# Altium footprint library Miscellaneous Connectors.PcbLib: 245 footprints (part 1 of 16)
Each footprint in its own frame and in the unit in brackets; x right, y up, seen from the top. Pads: shape width x height; smd on the part's side, far side on the other; paste and mask are expansions set on the pad; w line width, h text height; cw(c..) or ccw(c..) is an arc to the next point about the centre after c.
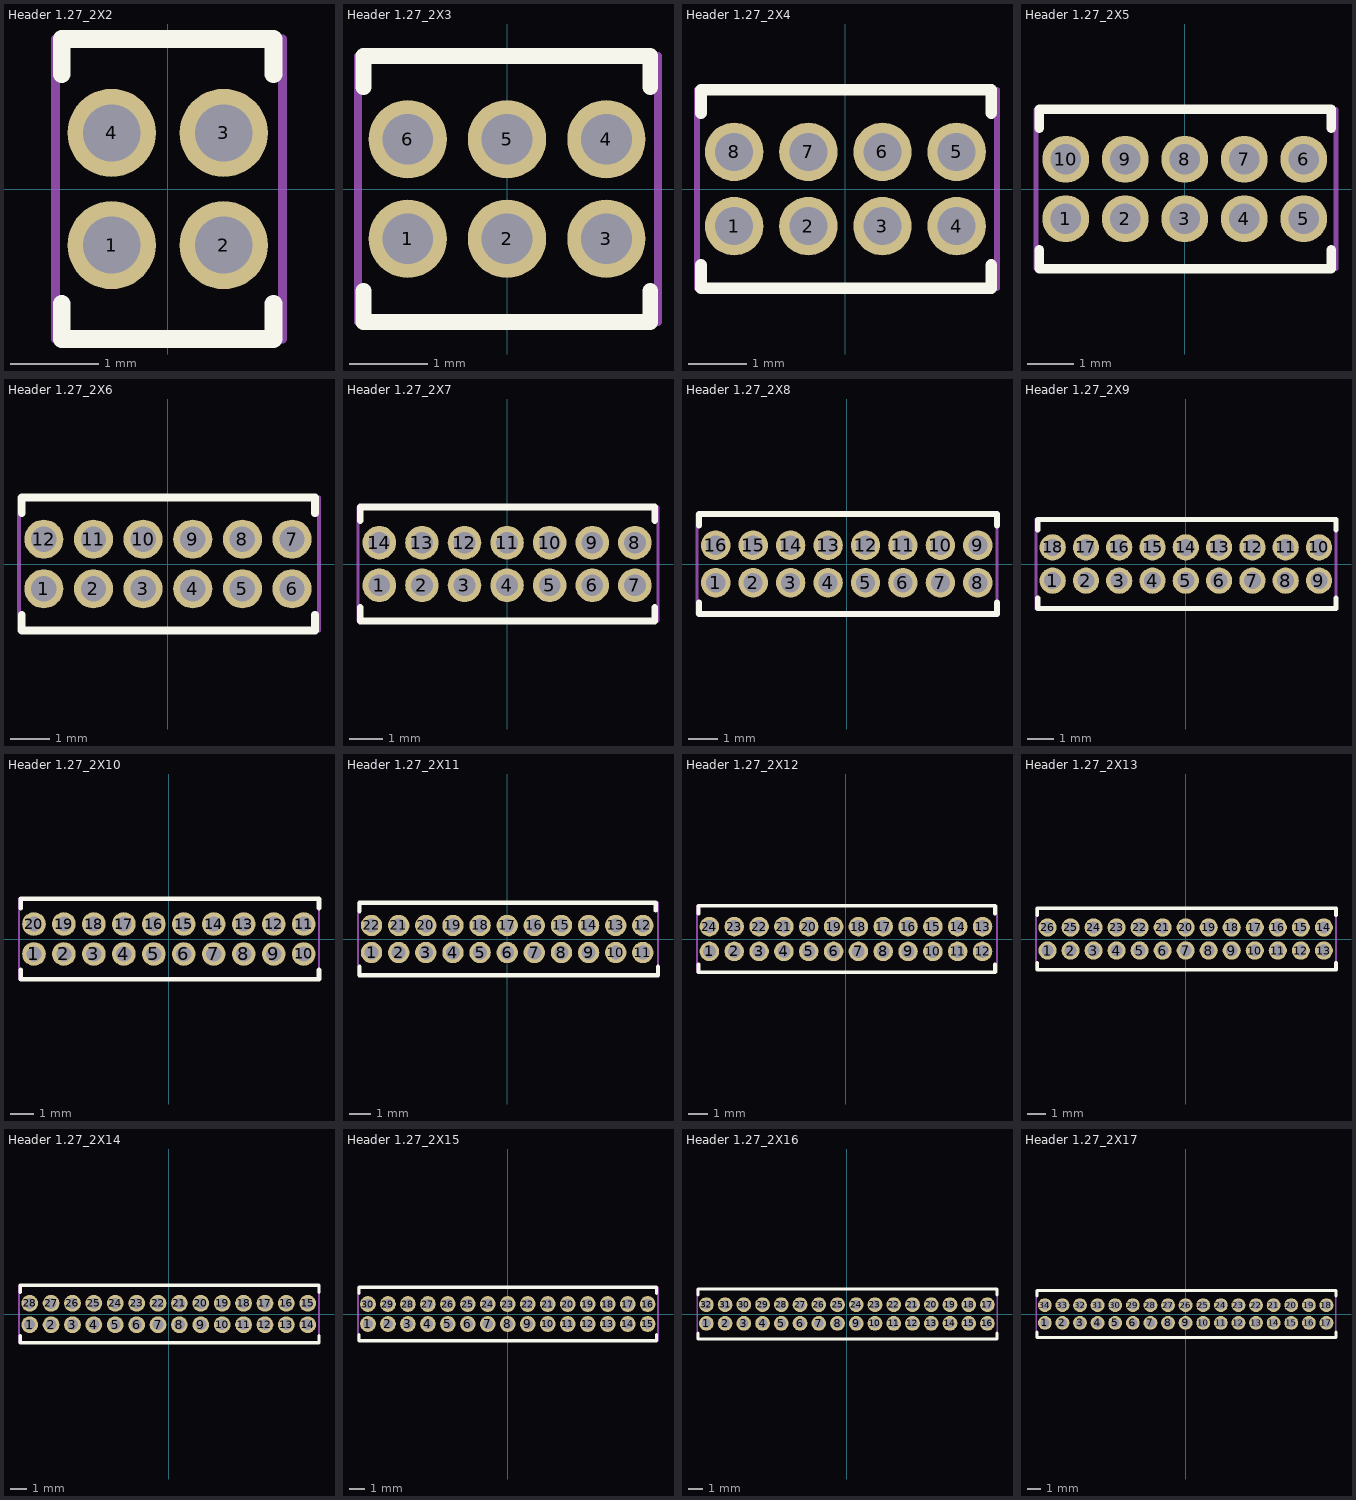
[diagram p0: the footprints below, top view; thin cyan lines are the x and y axes]

## Header 1.27_2X2 [mm]
pads (4):
  round 1 hole 0.65: 1(-0.635,-0.635) 2(0.635,-0.635) 3(0.635,0.635) 4(-0.635,0.635)
Top Overlay:
  lines w0.2: -1.2,-1.3 -1.2,-1.7 1.2,-1.7 1.2,-1.3 ; -1.2,1.3 -1.2,1.7 1.2,1.7 1.2,1.3
Mechanical 15:
  lines w0.1: -1.27,-1.7 -1.27,1.7 1.3,1.7 1.3,-1.7 -1.27,-1.7
3D body: height 4.7, standoff -2.6, extent -1.27,-1.5 1.27,1.5

## Header 1.27_2X3 [mm]
pads (6):
  round 1 hole 0.65: 1(-1.27,-0.635) 2(0,-0.635) 3(1.27,-0.635) 4(1.27,0.635) 5(0,0.635) 6(-1.27,0.635)
Top Overlay:
  lines w0.2: -1.835,-1.3 -1.835,-1.7 1.83,-1.7 1.83,-1.3 ; -1.835,1.3 -1.835,1.7 1.83,1.7 1.83,1.3
Mechanical 15:
  lines w0.1: -1.905,-1.7 -1.905,1.7 1.93,1.7 1.93,-1.7 -1.905,-1.7
3D body: height 4.7, standoff -2.6, extent -1.905,-1.5 1.905,1.5

## Header 1.27_2X4 [mm]
pads (8):
  round 1 hole 0.65: 1(-1.905,-0.635) 2(-0.635,-0.635) 3(0.635,-0.635) 4(1.905,-0.635) 5(1.905,0.635) 6(0.635,0.635) 7(-0.635,0.635) 8(-1.905,0.635)
Top Overlay:
  lines w0.2: -2.47,-1.3 -2.47,-1.7 2.495,-1.7 2.495,-1.3 ; -2.47,1.3 -2.47,1.7 2.495,1.7 2.495,1.3
Mechanical 15:
  lines w0.1: -2.54,-1.7 -2.54,1.7 2.595,1.7 2.595,-1.7 -2.54,-1.7
3D body: height 4.7, standoff -2.6, extent -2.54,-1.5 2.54,1.5

## Header 1.27_2X5 [mm]
pads (10):
  round 1 hole 0.65: 1(-2.54,-0.635) 2(-1.27,-0.635) 3(0,-0.635) 4(1.27,-0.635) 5(2.54,-0.635) 6(2.54,0.635) 7(1.27,0.635) 8(0,0.635) 9(-1.27,0.635) 10(-2.54,0.635)
Top Overlay:
  lines w0.2: -3.105,-1.3 -3.105,-1.7 3.13,-1.7 3.13,-1.3 ; -3.105,1.3 -3.105,1.7 3.13,1.7 3.13,1.3
Mechanical 15:
  lines w0.1: -3.175,-1.7 -3.175,1.7 3.23,1.7 3.23,-1.7 -3.175,-1.7
3D body: height 4.7, standoff -2.6, extent -3.175,-1.5 3.175,1.5

## Header 1.27_2X6 [mm]
pads (12):
  round 1 hole 0.65: 1(-3.175,-0.635) 2(-1.905,-0.635) 3(-0.635,-0.635) 4(0.635,-0.635) 5(1.905,-0.635) 6(3.175,-0.635) 7(3.175,0.635) 8(1.905,0.635) 9(0.635,0.635) 10(-0.635,0.635) 11(-1.905,0.635) 12(-3.175,0.635)
Top Overlay:
  lines w0.2: -3.74,-1.3 -3.74,-1.7 3.765,-1.7 3.765,-1.3 ; -3.74,1.3 -3.74,1.7 3.765,1.7 3.765,1.3
Mechanical 15:
  lines w0.1: -3.81,-1.7 -3.81,1.7 3.865,1.7 3.865,-1.7 -3.81,-1.7
3D body: height 4.7, standoff -2.6, extent -3.81,-1.5 3.81,1.5

## Header 1.27_2X7 [mm]
pads (14):
  round 1 hole 0.65: 1(-3.81,-0.635) 2(-2.54,-0.635) 3(-1.27,-0.635) 4(0,-0.635) 5(1.27,-0.635) 6(2.54,-0.635) 7(3.81,-0.635) 8(3.81,0.635) 9(2.54,0.635) 10(1.27,0.635) 11(0,0.635) 12(-1.27,0.635) 13(-2.54,0.635) 14(-3.81,0.635)
Top Overlay:
  lines w0.2: -4.375,-1.3 -4.375,-1.7 4.4,-1.7 4.4,-1.3 ; -4.375,1.3 -4.375,1.7 4.4,1.7 4.4,1.3
Mechanical 15:
  lines w0.1: -4.445,-1.7 4.5,-1.7 4.5,1.7 -4.445,1.7 -4.445,-1.7
3D body: height 4.7, standoff -2.6, extent -4.445,-1.5 4.445,1.5

## Header 1.27_2X8 [mm]
pads (16):
  round 1 hole 0.65: 1(-4.445,-0.635) 2(-3.175,-0.635) 3(-1.905,-0.635) 4(-0.635,-0.635) 5(0.635,-0.635) 6(1.905,-0.635) 7(3.175,-0.635) 8(4.445,-0.635) 9(4.445,0.635) 10(3.175,0.635) 11(1.905,0.635) 12(0.635,0.635) 13(-0.635,0.635) 14(-1.905,0.635) 15(-3.175,0.635) 16(-4.445,0.635)
Top Overlay:
  lines w0.2: -5.01,-1.3 -5.01,-1.7 5.095,-1.7 5.095,-1.3 ; -5.01,1.3 -5.01,1.7 5.095,1.7 5.095,1.3
Mechanical 15:
  lines w0.1: -5.08,-1.7 -5.08,1.7 5.095,1.7 5.095,-1.7 -5.08,-1.7
3D body: height 4.7, standoff -2.6, extent -5.08,-1.5 5.08,1.5

## Header 1.27_2X9 [mm]
pads (18):
  round 1 hole 0.65: 1(-5.08,-0.635) 2(-3.81,-0.635) 3(-2.54,-0.635) 4(-1.27,-0.635) 5(0,-0.635) 6(1.27,-0.635) 7(2.54,-0.635) 8(3.81,-0.635) 9(5.08,-0.635) 10(5.08,0.635) 11(3.81,0.635) 12(2.54,0.635) 13(1.27,0.635) 14(0,0.635) 15(-1.27,0.635) 16(-2.54,0.635) 17(-3.81,0.635) 18(-5.08,0.635)
Top Overlay:
  lines w0.2: -5.645,-1.3 -5.645,-1.7 5.73,-1.7 5.73,-1.3 ; -5.645,1.3 -5.645,1.7 5.73,1.7 5.73,1.3
Mechanical 15:
  lines w0.1: -5.715,-1.7 5.73,-1.7 5.73,1.7 -5.715,1.7 -5.715,-1.7
3D body: height 4.7, standoff -2.6, extent -5.715,-1.5 5.715,1.5

## Header 1.27_2X10 [mm]
pads (20):
  round 1 hole 0.65: 1(-5.715,-0.635) 2(-4.445,-0.635) 3(-3.175,-0.635) 4(-1.905,-0.635) 5(-0.635,-0.635) 6(0.635,-0.635) 7(1.905,-0.635) 8(3.175,-0.635) 9(4.445,-0.635) 10(5.715,-0.635) 11(5.715,0.635) 12(4.445,0.635) 13(3.175,0.635) 14(1.905,0.635) 15(0.635,0.635) 16(-0.635,0.635) 17(-1.905,0.635) 18(-3.175,0.635) 19(-4.445,0.635) 20(-5.715,0.635)
Top Overlay:
  lines w0.2: -6.28,-1.3 -6.28,-1.7 6.365,-1.7 6.365,-1.3 ; -6.28,1.3 -6.28,1.7 6.365,1.7 6.365,1.3
Mechanical 15:
  lines w0.1: -6.35,-1.7 -6.35,1.7 6.365,1.7 6.365,-1.7 -6.35,-1.7
3D body: height 4.7, standoff -2.6, extent -6.35,-1.5 6.35,1.5

## Header 1.27_2X11 [mm]
pads (22):
  round 1 hole 0.65: 1(-6.35,-0.635) 2(-5.08,-0.635) 3(-3.81,-0.635) 4(-2.54,-0.635) 5(-1.27,-0.635) 6(0,-0.635) 7(1.27,-0.635) 8(2.54,-0.635) 9(3.81,-0.635) 10(5.08,-0.635) 11(6.35,-0.635) 12(6.35,0.635) 13(5.08,0.635) 14(3.81,0.635) 15(2.54,0.635) 16(1.27,0.635) 17(0,0.635) 18(-1.27,0.635) 19(-2.54,0.635) 20(-3.81,0.635) 21(-5.08,0.635) 22(-6.35,0.635)
Top Overlay:
  lines w0.2: -6.915,-1.3 -6.915,-1.7 7.06,-1.7 7.06,-1.3 ; -6.915,1.3 -6.915,1.7 6.96,1.7 6.96,1.335
Mechanical 15:
  lines w0.1: -6.985,-1.7 7.06,-1.7 7.06,1.7 -6.985,1.7 -6.985,-1.7
3D body: height 4.7, standoff -2.6, extent -6.985,-1.5 6.985,1.5

## Header 1.27_2X12 [mm]
pads (24):
  round 1 hole 0.65: 1(-6.985,-0.635) 2(-5.715,-0.635) 3(-4.445,-0.635) 4(-3.175,-0.635) 5(-1.905,-0.635) 6(-0.635,-0.635) 7(0.635,-0.635) 8(1.905,-0.635) 9(3.175,-0.635) 10(4.445,-0.635) 11(5.715,-0.635) 12(6.985,-0.635) 13(6.985,0.635) 14(5.715,0.635) 15(4.445,0.635) 16(3.175,0.635) 17(1.905,0.635) 18(0.635,0.635) 19(-0.635,0.635) 20(-1.905,0.635) 21(-3.175,0.635) 22(-4.445,0.635) 23(-5.715,0.635) 24(-6.985,0.635)
Top Overlay:
  lines w0.2: -7.55,-1.3 -7.55,-1.7 7.625,-1.7 7.625,-1.3 ; -7.55,1.3 -7.55,1.7 7.625,1.7 7.625,1.3
Mechanical 15:
  lines w0.1: -7.62,-1.7 -7.62,1.7 7.725,1.7 7.725,-1.7 -7.62,-1.7
3D body: height 4.7, standoff -2.6, extent -7.62,-1.5 7.62,1.5

## Header 1.27_2X13 [mm]
pads (26):
  round 1 hole 0.65: 1(-7.62,-0.635) 2(-6.35,-0.635) 3(-5.08,-0.635) 4(-3.81,-0.635) 5(-2.54,-0.635) 6(-1.27,-0.635) 7(0,-0.635) 8(1.27,-0.635) 9(2.54,-0.635) 10(3.81,-0.635) 11(5.08,-0.635) 12(6.35,-0.635) 13(7.62,-0.635) 14(7.62,0.635) 15(6.35,0.635) 16(5.08,0.635) 17(3.81,0.635) 18(2.54,0.635) 19(1.27,0.635) 20(0,0.635) 21(-1.27,0.635) 22(-2.54,0.635) 23(-3.81,0.635) 24(-5.08,0.635) 25(-6.35,0.635) 26(-7.62,0.635)
Top Overlay:
  lines w0.2: -8.185,-1.3 -8.185,-1.7 8.29,-1.7 8.29,-1.3 ; -8.185,1.3 -8.185,1.7 8.29,1.7 8.29,1.3
Mechanical 15:
  lines w0.1: -8.255,-1.7 8.29,-1.7 8.29,1.7 -8.255,1.7 -8.255,-1.7
3D body: height 4.7, standoff -2.6, extent -8.255,-1.5 8.255,1.5

## Header 1.27_2X14 [mm]
pads (28):
  round 1 hole 0.65: 1(-8.255,-0.635) 2(-6.985,-0.635) 3(-5.715,-0.635) 4(-4.445,-0.635) 5(-3.175,-0.635) 6(-1.905,-0.635) 7(-0.635,-0.635) 8(0.635,-0.635) 9(1.905,-0.635) 10(3.175,-0.635) 11(4.445,-0.635) 12(5.715,-0.635) 13(6.985,-0.635) 14(8.255,-0.635) 15(8.255,0.635) 16(6.985,0.635) 17(5.715,0.635) 18(4.445,0.635) 19(3.175,0.635) 20(1.905,0.635) 21(0.635,0.635) 22(-0.635,0.635) 23(-1.905,0.635) 24(-3.175,0.635) 25(-4.445,0.635) 26(-5.715,0.635) 27(-6.985,0.635) 28(-8.255,0.635)
Top Overlay:
  lines w0.2: -8.82,-1.3 -8.82,-1.7 8.925,-1.7 8.925,-1.3 ; -8.82,1.3 -8.82,1.7 8.925,1.7 8.925,1.3
Mechanical 15:
  lines w0.1: -8.89,-1.7 -8.89,1.7 8.925,1.7 8.925,-1.7 -8.89,-1.7
3D body: height 4.7, standoff -2.6, extent -8.89,-1.5 8.89,1.5

## Header 1.27_2X15 [mm]
pads (30):
  round 1 hole 0.65: 1(-8.89,-0.635) 2(-7.62,-0.635) 3(-6.35,-0.635) 4(-5.08,-0.635) 5(-3.81,-0.635) 6(-2.54,-0.635) 7(-1.27,-0.635) 8(0,-0.635) 9(1.27,-0.635) 10(2.54,-0.635) 11(3.81,-0.635) 12(5.08,-0.635) 13(6.35,-0.635) 14(7.62,-0.635) 15(8.89,-0.635) 16(8.89,0.635) 17(7.62,0.635) 18(6.35,0.635) 19(5.08,0.635) 20(3.81,0.635) 21(2.54,0.635) 22(1.27,0.635) 23(0,0.635) 24(-1.27,0.635) 25(-2.54,0.635) 26(-3.81,0.635) 27(-5.08,0.635) 28(-6.35,0.635) 29(-7.62,0.635) 30(-8.89,0.635)
Top Overlay:
  lines w0.2: -9.455,-1.3 -9.455,-1.7 9.45,-1.7 9.45,-1.3 ; -9.455,1.3 -9.455,1.7 9.45,1.7 9.45,1.3
Mechanical 15:
  lines w0.1: -9.525,-1.7 9.55,-1.7 9.55,1.7 -9.525,1.7 -9.525,-1.7
3D body: height 4.7, standoff -2.6, extent -9.525,-1.5 9.525,1.5

## Header 1.27_2X16 [mm]
pads (32):
  round 1 hole 0.65: 1(-9.525,-0.635) 2(-8.255,-0.635) 3(-6.985,-0.635) 4(-5.715,-0.635) 5(-4.445,-0.635) 6(-3.175,-0.635) 7(-1.905,-0.635) 8(-0.635,-0.635) 9(0.635,-0.635) 10(1.905,-0.635) 11(3.175,-0.635) 12(4.445,-0.635) 13(5.715,-0.635) 14(6.985,-0.635) 15(8.255,-0.635) 16(9.525,-0.635) 17(9.525,0.635) 18(8.255,0.635) 19(6.985,0.635) 20(5.715,0.635) 21(4.445,0.635) 22(3.175,0.635) 23(1.905,0.635) 24(0.635,0.635) 25(-0.635,0.635) 26(-1.905,0.635) 27(-3.175,0.635) 28(-4.445,0.635) 29(-5.715,0.635) 30(-6.985,0.635) 31(-8.255,0.635) 32(-9.525,0.635)
Top Overlay:
  lines w0.2: -10.09,-1.3 -10.09,-1.7 10.175,-1.7 10.175,-1.3 ; -10.09,1.3 -10.09,1.7 10.175,1.7 10.175,1.3
Mechanical 15:
  lines w0.1: -10.16,-1.7 -10.16,1.7 10.175,1.7 10.175,-1.7 -10.16,-1.7
3D body: height 4.7, standoff -2.6, extent -10.16,-1.5 10.16,1.5

## Header 1.27_2X17 [mm]
pads (34):
  round 1 hole 0.65: 1(-10.16,-0.635) 2(-8.89,-0.635) 3(-7.62,-0.635) 4(-6.35,-0.635) 5(-5.08,-0.635) 6(-3.81,-0.635) 7(-2.54,-0.635) 8(-1.27,-0.635) 9(0,-0.635) 10(1.27,-0.635) 11(2.54,-0.635) 12(3.81,-0.635) 13(5.08,-0.635) 14(6.35,-0.635) 15(7.62,-0.635) 16(8.89,-0.635) 17(10.16,-0.635) 18(10.16,0.635) 19(8.89,0.635) 20(7.62,0.635) 21(6.35,0.635) 22(5.08,0.635) 23(3.81,0.635) 24(2.54,0.635) 25(1.27,0.635) 26(0,0.635) 27(-1.27,0.635) 28(-2.54,0.635) 29(-3.81,0.635) 30(-5.08,0.635) 31(-6.35,0.635) 32(-7.62,0.635) 33(-8.89,0.635) 34(-10.16,0.635)
Top Overlay:
  lines w0.2: -10.725,-1.3 -10.725,-1.7 10.85,-1.7 10.85,-1.3 ; -10.725,1.3 -10.725,1.7 10.85,1.7 10.85,1.3
Mechanical 15:
  lines w0.1: -10.795,-1.7 10.85,-1.7 10.85,1.7 -10.795,1.7 -10.795,-1.7
3D body: height 4.7, standoff -2.6, extent -10.795,-1.5 10.795,1.5